# Altium footprint library FootPrintLib_11.PcbLib: 376 footprints (part 15 of 24)
Each footprint in its own frame and in the unit in brackets; x right, y up, seen from the top. Pads: shape width x height; smd on the part's side, far side on the other; paste and mask are expansions set on the pad; w line width, h text height; cw(c..) or ccw(c..) is an arc to the next point about the centre after c.
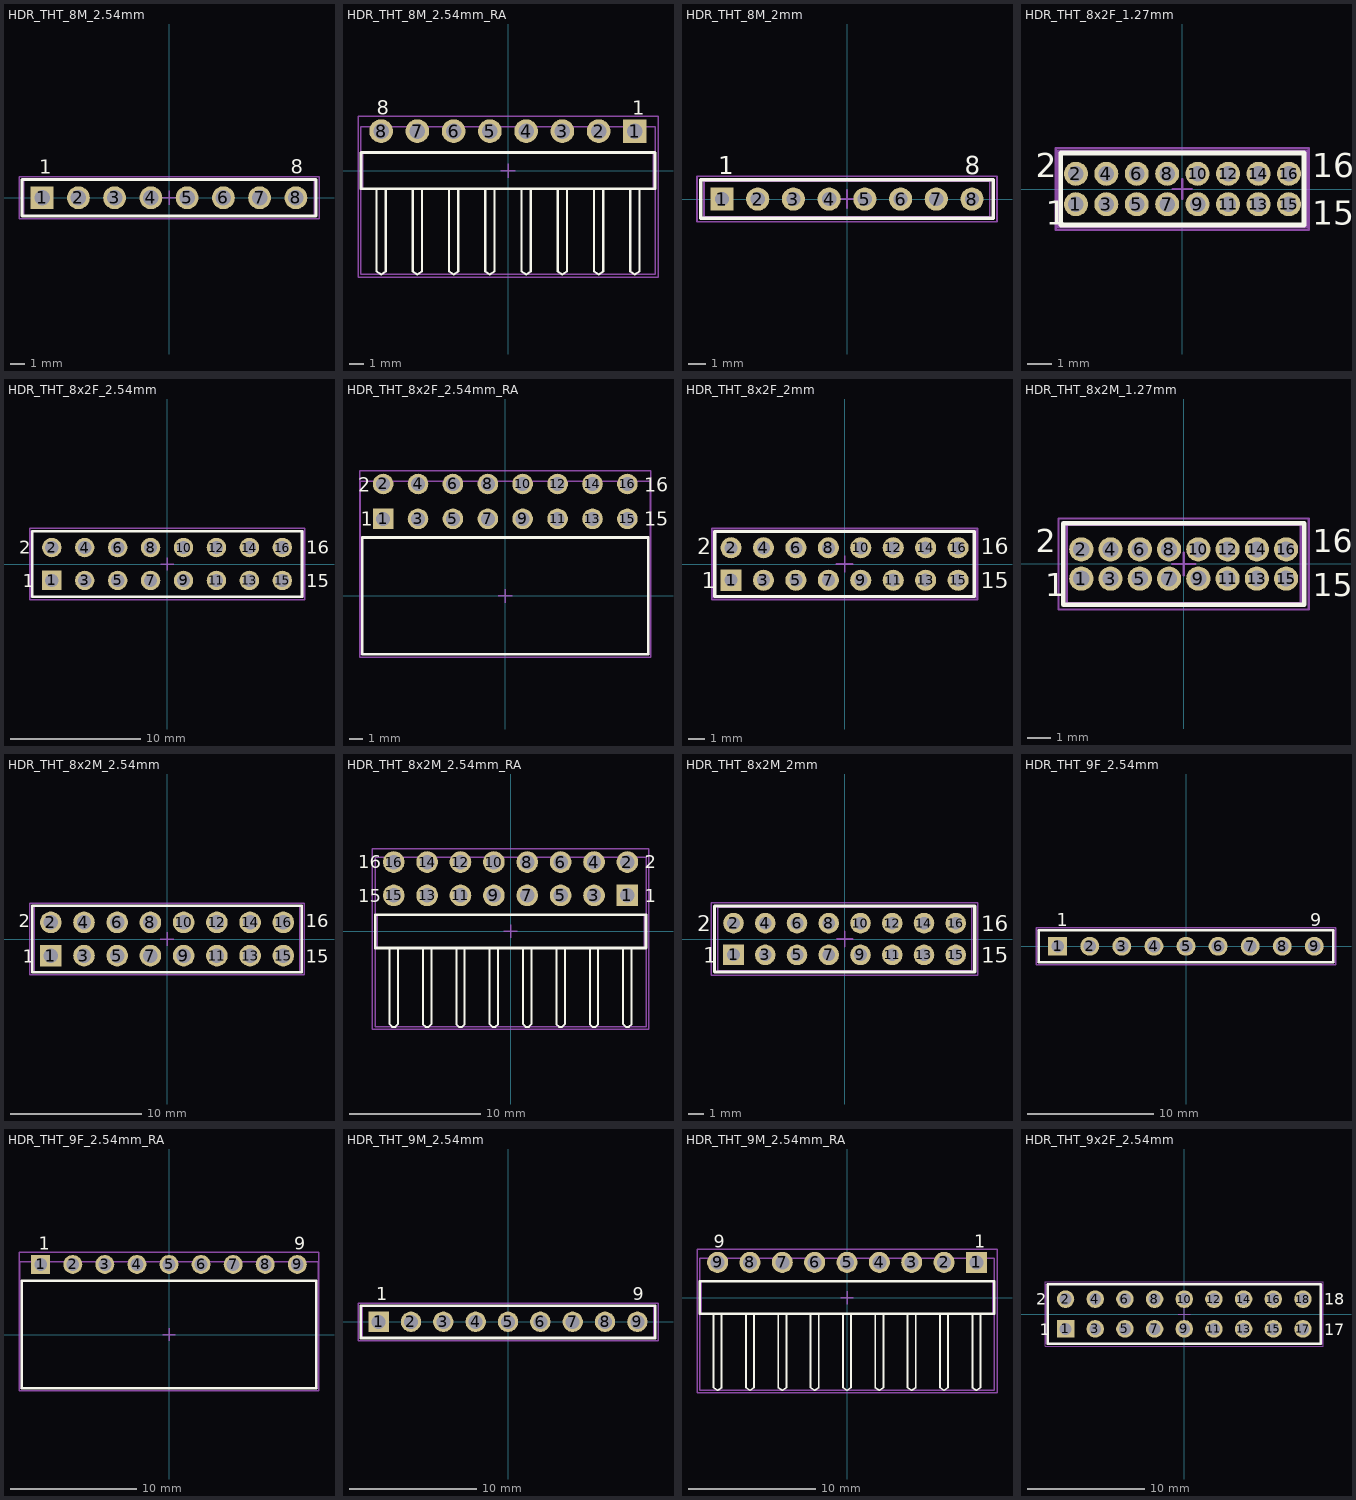
[diagram p14: the footprints below, top view; thin cyan lines are the x and y axes]

## HDR_THT_8M_2.54mm [mm] "Pin Header, pitch 2.54 mm, THT, Vertical, single row, 8p"
height 8.54
pads (8):
  rect 1.6x1.6 hole 1.1: 1(-8.89,0)
  round 1.6 hole 1.1: 2(-6.35,0) 3(-3.81,0) 4(-1.27,0) 5(1.27,0) 6(3.81,0) 7(6.35,0) 8(8.89,0)
Top Overlay:
  lines w0.2: -10.31,-1.27 10.31,-1.27 10.31,1.27 -10.31,1.27 -10.31,-1.27
  text "1" at -9.08,1.7 h1
  text "8" at 8.54,1.7 h1
Mechanical 11:
  lines w0.1: -10.16,-1.27 -10.16,1.27 10.16,1.27 10.16,-1.27 -10.16,-1.27
Mechanical 13:
  lines w0.1: -10.31,-1.27 10.31,-1.27 10.31,1.27 -10.31,1.27 -10.31,-1.27
Mechanical 15:
  lines w0.1: -0.5,0 0.5,0 ; 0,-0.5 0,0.5 ; -10.51,-1.47 10.51,-1.47 10.51,1.47 -10.51,1.47 -10.51,-1.47
3D body "61300811121.stp": height 8.57, standoff -2.97, extent -10.16,-1.27 10.16,1.27

## HDR_THT_8M_2.54mm_RA [mm] "Pin Header, pitch 2.54 mm, THT, Angled, single row, 8p"
height 2.54
pads (8):
  rect 1.65x1.65 hole 1.1: 1(8.89,2.77)
  round 1.65 hole 1.1: 2(6.35,2.77) 3(3.81,2.77) 4(1.27,2.77) 5(-1.27,2.77) 6(-3.81,2.77) 7(-6.35,2.77) 8(-8.89,2.77)
Top Overlay:
  lines w0.15: -9.21,-1.27 -9.21,-7.07 -8.89,-7.27 -8.57,-7.07 -8.57,-1.27 ; -6.67,-1.27 -6.67,-7.07 -6.35,-7.27 -6.03,-7.07 -6.03,-1.27 ; -4.13,-1.27 -4.13,-7.07 -3.81,-7.27 -3.49,-7.07 -3.49,-1.27 ; -1.59,-1.27 -1.59,-7.07 -1.27,-7.27 -0.95,-7.07 -0.95,-1.27 ; 0.95,-1.27 0.95,-7.07 1.27,-7.27 1.59,-7.07 1.59,-1.27 ; 3.49,-1.27 3.49,-7.07 3.81,-7.27 4.13,-7.07 4.13,-1.27 ; 6.03,-1.27 6.03,-7.07 6.35,-7.27 6.67,-7.07 6.67,-1.27 ; 8.57,-1.27 8.57,-7.07 8.89,-7.27 9.21,-7.07 9.21,-1.27
  lines w0.2: -10.31,-1.27 10.31,-1.27 10.31,1.27 -10.31,1.27 -10.31,-1.27
  text "1" at 8.72,3.9 h1
  text "8" at -9.21,3.9 h1
Mechanical 11:
  lines w0.1: -10.16,-1.27 10.16,-1.27 10.16,1.27 -10.16,1.27 -10.16,-1.27
Mechanical 13:
  lines w0.1: -10.31,-7.27 10.31,-7.27 10.31,3.09 -10.31,3.09 -10.31,-7.27
Mechanical 15:
  lines w0.1: -0.5,0 0.5,0 ; 0,-0.5 0,0.5 ; -10.51,-7.47 -10.51,3.795 10.51,3.795 10.51,-7.47 -10.51,-7.47
3D body "61300811021.stp": height 2.62, standoff -2.92, extent -10.16,-7.27 10.16,3.09

## HDR_THT_8M_2mm [mm] "Pin Header, pitch 2.00 mm, THT, Vertical, single row, 8p"
height 6.35
pads (8):
  rect 1.3x1.3 hole 0.8: 1(-7,0)
  round 1.3 hole 0.8: 2(-5,0) 3(-3,0) 4(-1,0) 5(1,0) 6(3,0) 7(5,0) 8(7,0)
Top Overlay:
  lines w0.2: -8.2,-1.075 -8.2,1.075 8.2,1.075 8.2,-1.075 -8.2,-1.075
  text "1" at -7.2,1.4 h1
  text "8" at 6.6,1.4 h1
Mechanical 11:
  lines w0.1: -8,-1 8,-1 8,1 -8,1 -8,-1
Mechanical 13:
  lines w0.1: -8.2,-1.075 -8.2,1.075 8.2,1.075 8.2,-1.075 -8.2,-1.075
Mechanical 15:
  lines w0.1: -0.5,0 0.5,0 ; 0,-0.5 0,0.5 ; -8.4,-1.275 -8.4,1.275 8.4,1.275 8.4,-1.275 -8.4,-1.275
3D body "62000811121.stp": height 6.05, standoff -2.65, extent -8,-1 8,1

## HDR_THT_8x2F_1.27mm [mm] "Socket Header, Pitch 1.27 mm, THT, Vertical, dual row, 16p"
height 4.65
pads (16):
  round 1 hole 0.65: 1(-4.445,-0.635) 2(-4.445,0.635) 3(-3.175,-0.635) 4(-3.175,0.635) 5(-1.905,-0.635) 6(-1.905,0.635) 7(-0.635,-0.635) 8(-0.635,0.635) 9(0.635,-0.635) 10(0.635,0.635) 11(1.905,-0.635) 12(1.905,0.635) 13(3.175,-0.635) 14(3.175,0.635) 15(4.445,-0.635) 16(4.445,0.635)
Top Overlay:
  lines w0.2: -5.08,-1.5 5.08,-1.5 5.08,1.5 -5.08,1.5 -5.08,-1.5
  text "16" at 5.41,0.5 h1
  text "15" at 5.41,-1.5 h1
  text "2" at -6.11,0.5 h1
  text "1" at -5.71,-1.5 h1
Mechanical 11:
  lines w0.1: -5.08,-1.5 5.08,-1.5 5.08,1.5 -5.08,1.5 -5.08,-1.5
Mechanical 13:
  lines w0.1: -5.205,-1.575 -5.205,1.575 5.205,1.575 5.205,-1.575 -5.205,-1.575
Mechanical 15:
  lines w0.1: -0.4,0 0.4,0 ; 0,-0.4 0,0.4 ; -5.28,-1.7 5.28,-1.7 5.28,1.7 -5.28,1.7 -5.28,-1.7
3D body "62201621821.stp": height 4.55, standoff -2.15, extent -5.28,-1.5 5.28,1.5

## HDR_THT_8x2F_2.54mm [mm] "Socket Header, Pitch 2.54 mm, THT, Vertical, dual row, 16p"
height 8.4
pads (16):
  rect 1.5x1.5 hole 1.02: 1(-8.89,-1.27)
  round 1.5 hole 1.02: 2(-8.89,1.27) 3(-6.35,-1.27) 4(-6.35,1.27) 5(-3.81,-1.27) 6(-3.81,1.27) 7(-1.27,-1.27) 8(-1.27,1.27) 9(1.27,-1.27) 10(1.27,1.27) 11(3.81,-1.27) 12(3.81,1.27) 13(6.35,-1.27) 14(6.35,1.27) 15(8.89,-1.27) 16(8.89,1.27)
Top Overlay:
  lines w0.2: -10.41,-2.54 -10.41,2.54 10.41,2.54 10.41,-2.54 -10.41,-2.54
  text "2" at -11.42,0.8 h1
  text "1" at -11.12,-1.8 h1
  text "15" at 10.72,-1.8 h1
  text "16" at 10.72,0.8 h1
Mechanical 11:
  lines w0.1: -10.41,-2.54 10.41,-2.54 10.41,2.54 -10.41,2.54 -10.41,-2.54
Mechanical 13:
  lines w0.1: -10.535,-2.54 -10.535,2.54 10.535,2.54 10.535,-2.54 -10.535,-2.54
Mechanical 15:
  lines w0.1: -0.5,0 0.5,0 ; 0,-0.5 0,0.5 ; -10.61,-2.74 -10.61,2.74 10.61,2.74 10.61,-2.74 -10.61,-2.74
3D body "61301621821.stp": height 8.45, standoff -3.05, extent -10.41,-2.54 10.41,2.54

## HDR_THT_8x2F_2.54mm_RA [mm] "Socket Header, Pitch 2.54 mm, THT, Angled, dual row, 16p"
height 5.08
pads (16):
  rect 1.5x1.5 hole 1.02: 1(-8.89,5.61)
  round 1.5 hole 1.02: 2(-8.89,8.15) 3(-6.35,5.61) 4(-6.35,8.15) 5(-3.81,5.61) 6(-3.81,8.15) 7(-1.27,5.61) 8(-1.27,8.15) 9(1.27,5.61) 10(1.27,8.15) 11(3.81,5.61) 12(3.81,8.15) 13(6.35,5.61) 14(6.35,8.15) 15(8.89,5.61) 16(8.89,8.15)
Top Overlay:
  lines w0.2: -10.41,-4.25 -10.41,4.25 10.41,4.25 10.41,-4.25 -10.41,-4.25
  text "2" at -10.72,7.6 h1
  text "1" at -10.52,5.1 h1
  text "15" at 10.12,5.1 h1
  text "16" at 10.12,7.6 h1
Mechanical 11:
  lines w0.1: -10.41,-4.25 10.41,-4.25 10.41,4.25 -10.41,4.25 -10.41,-4.25
Mechanical 13:
  lines w0.1: -10.56,-4.25 10.56,-4.25 10.56,8.35 -10.56,8.35 -10.56,-4.25
Mechanical 15:
  lines w0.1: -0.5,0 0.5,0 ; 0,-0.5 0,0.5 ; -10.61,-4.45 10.61,-4.45 10.61,9.1 -10.61,9.1 -10.61,-4.45
3D body "613016243121.stp": height 5.05, standoff -3.25, extent -10.41,-4.25 10.41,8.35

## HDR_THT_8x2F_2mm [mm] "Socket Header, Pitch 2.00 mm, THT, Vertical, dual row, 16p"
height 4.45
pads (16):
  rect 1.3x1.3 hole 0.8: 1(-7,-1)
  round 1.3 hole 0.8: 2(-7,1) 3(-5,-1) 4(-5,1) 5(-3,-1) 6(-3,1) 7(-1,-1) 8(-1,1) 9(1,-1) 10(1,1) 11(3,-1) 12(3,1) 13(5,-1) 14(5,1) 15(7,-1) 16(7,1)
Top Overlay:
  lines w0.2: -8,-2 8,-2 8,2 -8,2 -8,-2
  text "15" at 8.4,-1.5 h1
  text "16" at 8.4,0.6 h1
  text "2" at -9.1,0.6 h1
  text "1" at -8.8,-1.5 h1
Mechanical 11:
  lines w0.1: -8,-2 8,-2 8,2 -8,2 -8,-2
Mechanical 13:
  lines w0.1: -8.15,-2.075 8.15,-2.075 8.15,2.075 -8.15,2.075 -8.15,-2.075
Mechanical 15:
  lines w0.1: -0.5,0 0.5,0 ; 0,-0.5 0,0.5 ; -8.2,-2.2 8.2,-2.2 8.2,2.2 -8.2,2.2 -8.2,-2.2
3D body "62001621821.stp": height 4.35, standoff -2.35, extent -8.25,-2 8.25,2

## HDR_THT_8x2M_1.27mm [mm] "Pin Header, pitch 1.27 mm, THT, Vertical, dual row, 16p"
height 5.65
pads (16):
  round 1.05 hole 0.7: 1(-4.445,-0.635) 2(-4.445,0.635) 3(-3.175,-0.635) 4(-3.175,0.635) 5(-1.905,-0.635) 6(-1.905,0.635) 7(-0.635,-0.635) 8(-0.635,0.635) 9(0.635,-0.635) 10(0.635,0.635) 11(1.905,-0.635) 12(1.905,0.635) 13(3.175,-0.635) 14(3.175,0.635) 15(4.445,-0.635) 16(4.445,0.635)
Top Overlay:
  lines w0.2: -5.23,-1.775 -5.23,1.775 5.23,1.775 5.23,-1.775 -5.23,-1.775
  text "16" at 5.61,0.5 h1
  text "15" at 5.61,-1.4 h1
  text "1" at -6.01,-1.4 h1
  text "2" at -6.41,0.5 h1
Mechanical 11:
  lines w0.1: -5.08,-1.7 -5.08,1.7 5.08,1.7 5.08,-1.7 -5.08,-1.7
Mechanical 13:
  lines w0.1: -5.23,-1.775 -5.23,1.775 5.23,1.775 5.23,-1.775 -5.23,-1.775
Mechanical 15:
  lines w0.1: -0.5,0 0.5,0 ; 0,-0.5 0,0.5 ; -5.43,-1.975 5.43,-1.975 5.43,1.975 -5.43,1.975 -5.43,-1.975
3D body "62201621121.stp": height 5.33, standoff -2.27, extent -5.08,-1.7 5.08,1.7

## HDR_THT_8x2M_2.54mm [mm] "Pin Header, pitch 2.54 mm, THT, Vertical, dual row, 16p"
height 8.54
pads (16):
  rect 1.65x1.65 hole 1.1: 1(-8.89,-1.27)
  round 1.65 hole 1.1: 2(-8.89,1.27) 3(-6.35,-1.27) 4(-6.35,1.27) 5(-3.81,-1.27) 6(-3.81,1.27) 7(-1.27,-1.27) 8(-1.27,1.27) 9(1.27,-1.27) 10(1.27,1.27) 11(3.81,-1.27) 12(3.81,1.27) 13(6.35,-1.27) 14(6.35,1.27) 15(8.89,-1.27) 16(8.89,1.27)
Top Overlay:
  lines w0.2: -10.31,-2.54 -10.31,2.54 10.31,2.54 10.31,-2.54 -10.31,-2.54
  text "16" at 10.62,0.9 h1
  text "15" at 10.62,-1.8 h1
  text "2" at -11.32,0.9 h1
  text "1" at -11.02,-1.8 h1
Mechanical 11:
  lines w0.1: -10.16,-2.54 -10.16,2.54 10.16,2.54 10.16,-2.54 -10.16,-2.54
Mechanical 13:
  lines w0.1: -10.31,-2.54 -10.31,2.54 10.31,2.54 10.31,-2.54 -10.31,-2.54
Mechanical 15:
  lines w0.1: -0.5,0 0.5,0 ; 0,-0.5 0,0.5 ; -10.51,-2.74 -10.51,2.74 10.51,2.74 10.51,-2.74 -10.51,-2.74
3D body "61301621121.stp": height 8.59, standoff -2.95, extent -10.16,-2.54 10.16,2.54

## HDR_THT_8x2M_2.54mm_RA [mm] "Pin Header, pitch 2.54 mm, THT, Angled, dual row, 16p"
height 5.08
pads (16):
  rect 1.65x1.65 hole 1.1: 1(8.89,2.73)
  round 1.65 hole 1.1: 2(8.89,5.27) 3(6.35,2.73) 4(6.35,5.27) 5(3.81,2.73) 6(3.81,5.27) 7(1.27,2.73) 8(1.27,5.27) 9(-1.27,2.73) 10(-1.27,5.27) 11(-3.81,2.73) 12(-3.81,5.27) 13(-6.35,2.73) 14(-6.35,5.27) 15(-8.89,2.73) 16(-8.89,5.27)
Top Overlay:
  lines w0.15: -9.21,-1.335 -9.21,-7.07 -9.01,-7.27 -8.77,-7.27 -8.57,-7.07 -8.57,-1.31 ; -6.67,-1.335 -6.67,-7.07 -6.47,-7.27 -6.23,-7.27 -6.03,-7.07 -6.03,-1.31 ; -4.13,-1.335 -4.13,-7.07 -3.93,-7.27 -3.69,-7.27 -3.49,-7.07 -3.49,-1.31 ; -1.59,-1.335 -1.59,-7.07 -1.39,-7.27 -1.15,-7.27 -0.95,-7.07 -0.95,-1.31 ; 0.95,-1.335 0.95,-7.07 1.15,-7.27 1.39,-7.27 1.59,-7.07 1.59,-1.31 ; 3.49,-1.335 3.49,-7.07 3.69,-7.27 3.93,-7.27 4.13,-7.07 4.13,-1.31 ; 6.03,-1.335 6.03,-7.07 6.23,-7.27 6.47,-7.27 6.67,-7.07 6.67,-1.31 ; 8.57,-1.335 8.57,-7.07 8.77,-7.27 9.01,-7.27 9.21,-7.07 9.21,-1.31
  lines w0.2: -10.31,-1.27 -10.31,1.27 10.31,1.27 10.31,-1.27 -10.31,-1.27
  text "15" at -11.61,2.2 h1
  text "16" at -11.61,4.8 h1
  text "1" at 10.22,2.2 h1
  text "2" at 10.22,4.8 h1
Mechanical 11:
  lines w0.1: -10.16,-1.27 -10.16,1.27 10.16,1.27 10.16,-1.27 -10.16,-1.27
Mechanical 13:
  lines w0.1: -10.31,-7.27 10.31,-7.27 10.31,5.63 -10.31,5.63 -10.31,-7.27
Mechanical 15:
  lines w0.1: -0.5,0 0.5,0 ; 0,-0.5 0,0.5 ; -10.51,-7.47 10.51,-7.47 10.51,6.295 -10.51,6.295 -10.51,-7.47
3D body "61301621021.stp": height 5.14, standoff -2.94, extent -10.16,-7.27 10.16,5.63

## HDR_THT_8x2M_2mm [mm] "2.00 mm THT Dual Pin Header, 16p"
height 6
pads (16):
  rect 1.3x1.3 hole 0.8: 1(-7,-1)
  round 1.3 hole 0.8: 2(-7,1) 3(-5,-1) 4(-5,1) 5(-3,-1) 6(-3,1) 7(-1,-1) 8(-1,1) 9(1,-1) 10(1,1) 11(3,-1) 12(3,1) 13(5,-1) 14(5,1) 15(7,-1) 16(7,1)
Top Overlay:
  lines w0.2: -8.2,-2.075 8.2,-2.075 8.2,2.075 -8.2,2.075 -8.2,-2.075
  text "16" at 8.6,0.5 h1
  text "15" at 8.6,-1.5 h1
  text "2" at -9.3,0.5 h1
  text "1" at -8.9,-1.5 h1
Mechanical 11:
  lines w0.1: -8,-2 8,-2 8,2 -8,2 -8,-2
Mechanical 13:
  lines w0.1: -8.2,-2.075 8.2,-2.075 8.2,2.075 -8.2,2.075 -8.2,-2.075
Mechanical 15:
  lines w0.1: -0.5,0 0.5,0 ; 0,-0.5 0,0.5 ; -8.4,-2.275 8.4,-2.275 8.4,2.275 -8.4,2.275 -8.4,-2.275
3D body "62001621121.stp": height 6.05, standoff -2.65, extent -8,-2 8,2

## HDR_THT_9F_2.54mm [mm] "Socket Header, Pitch 2.54 mm, THT, Vertical, single row, 9p"
height 8.5
pads (9):
  rect 1.5x1.5 hole 1.02: 1(-10.16,0)
  round 1.5 hole 1.02: 2(-7.62,0) 3(-5.08,0) 4(-2.54,0) 5(0,0) 6(2.54,0) 7(5.08,0) 8(7.62,0) 9(10.16,0)
Top Overlay:
  lines w0.2: -11.68,-1.25 11.68,-1.25 11.68,1.25 -11.68,1.25 -11.68,-1.25
  text "9" at 9.85,1.6 h1
  text "1" at -10.25,1.6 h1
Mechanical 11:
  lines w0.1: -11.68,-1.25 11.68,-1.25 11.68,1.25 -11.68,1.25 -11.68,-1.25
Mechanical 13:
  lines w0.1: -11.805,-1.25 -11.805,1.25 11.805,1.25 11.805,-1.25 -11.805,-1.25
Mechanical 15:
  lines w0.1: -0.5,0 0.5,0 ; 0,-0.5 0,0.5 ; -11.88,-1.45 -11.88,1.45 11.88,1.45 11.88,-1.45 -11.88,-1.45
3D body "61300911821.stp": height 8.55, standoff -3.06, extent -11.68,-1.25 11.68,1.25

## HDR_THT_9F_2.54mm_RA [mm] "Socket Header, Pitch 2.54 mm, THT, Angled, single row, 19p"
height 2.5
pads (9):
  rect 1.5x1.5 hole 1.02: 1(-10.16,5.55)
  round 1.5 hole 1.02: 2(-7.62,5.55) 3(-5.08,5.55) 4(-2.54,5.55) 5(0,5.55) 6(2.54,5.55) 7(5.08,5.55) 8(7.62,5.55) 9(10.16,5.55)
Top Overlay:
  lines w0.2: -11.68,-4.25 -11.68,4.25 11.68,4.25 11.68,-4.25 -11.68,-4.25
  text "9" at 9.9,6.7 h1
  text "1" at -10.32,6.7 h1
Mechanical 11:
  lines w0.1: -11.68,-4.25 11.68,-4.25 11.68,4.25 -11.68,4.25 -11.68,-4.25
Mechanical 13:
  lines w0.1: -11.805,-4.25 -11.805,5.75 11.805,5.75 11.805,-4.25 -11.805,-4.25
Mechanical 15:
  lines w0.1: -0.5,0 0.5,0 ; 0,-0.5 0,0.5 ; -11.88,-4.45 -11.88,6.5 11.88,6.5 11.88,-4.45 -11.88,-4.45
3D body "613009143121.stp": height 2.55, standoff -3.04, extent -11.68,-4.25 11.68,5.75

## HDR_THT_9M_2.54mm [mm] "Pin Header, pitch 2.54 mm, THT, Vertical, single row, 9p"
height 8.54
pads (9):
  rect 1.6x1.6 hole 1.1: 1(-10.16,0)
  round 1.6 hole 1.1: 2(-7.62,0) 3(-5.08,0) 4(-2.54,0) 5(0,0) 6(2.54,0) 7(5.08,0) 8(7.62,0) 9(10.16,0)
Top Overlay:
  lines w0.2: -11.58,-1.27 -11.58,1.27 11.58,1.27 11.58,-1.27 -11.58,-1.27
  text "9" at 9.81,1.7 h1
  text "1" at -10.35,1.7 h1
Mechanical 11:
  lines w0.1: -11.43,-1.27 11.43,-1.27 11.43,1.27 -11.43,1.27 -11.43,-1.27
Mechanical 13:
  lines w0.1: -11.58,-1.27 -11.58,1.27 11.58,1.27 11.58,-1.27 -11.58,-1.27
Mechanical 15:
  lines w0.1: -0.5,0 0.5,0 ; 0,-0.5 0,0.5 ; -11.78,-1.47 -11.78,1.47 11.78,1.47 11.78,-1.47 -11.78,-1.47
3D body "61300911121.stp": height 8.57, standoff -2.97, extent -11.43,-1.27 11.43,1.27

## HDR_THT_9M_2.54mm_RA [mm] "Pin Header, pitch 2.54 mm, THT, Angled, single row, 9p"
height 2.54
pads (9):
  rect 1.65x1.65 hole 1.1: 1(10.16,2.77)
  round 1.65 hole 1.1: 2(7.62,2.77) 3(5.08,2.77) 4(2.54,2.77) 5(0,2.77) 6(-2.54,2.77) 7(-5.08,2.77) 8(-7.62,2.77) 9(-10.16,2.77)
Top Overlay:
  lines w0.15: -10.48,-1.27 -10.48,-7.07 -10.16,-7.27 -9.84,-7.07 -9.84,-1.27 ; -7.94,-1.27 -7.94,-7.07 -7.62,-7.27 -7.3,-7.07 -7.3,-1.27 ; -5.4,-1.27 -5.4,-7.07 -5.08,-7.27 -4.76,-7.07 -4.76,-1.27 ; -2.86,-1.27 -2.86,-7.07 -2.54,-7.27 -2.22,-7.07 -2.22,-1.27 ; -0.32,-1.27 -0.32,-7.07 0,-7.27 0.32,-7.07 0.32,-1.27 ; 2.22,-1.27 2.22,-7.07 2.54,-7.27 2.86,-7.07 2.86,-1.27 ; 4.76,-1.27 4.76,-7.07 5.08,-7.27 5.4,-7.07 5.4,-1.27 ; 7.3,-1.27 7.3,-7.07 7.62,-7.27 7.94,-7.07 7.94,-1.27 ; 9.84,-1.27 9.84,-7.07 10.16,-7.27 10.48,-7.07 10.48,-1.27
  lines w0.2: -11.58,-1.27 11.58,-1.27 11.58,1.27 -11.58,1.27 -11.58,-1.27
  text "1" at 9.99,3.9 h1
  text "9" at -10.48,3.9 h1
Mechanical 11:
  lines w0.1: -11.43,-1.27 11.43,-1.27 11.43,1.27 -11.43,1.27 -11.43,-1.27
Mechanical 13:
  lines w0.1: -11.58,-7.27 11.58,-7.27 11.58,3.09 -11.58,3.09 -11.58,-7.27
Mechanical 15:
  lines w0.1: -0.5,0 0.5,0 ; 0,-0.5 0,0.5 ; -11.78,-7.47 -11.78,3.795 11.78,3.795 11.78,-7.47 -11.78,-7.47
3D body "61300911021.stp": height 2.62, standoff -2.92, extent -11.43,-7.27 11.43,3.09

## HDR_THT_9x2F_2.54mm [mm] "Socket Header, Pitch 2.54 mm, THT, Vertical, dual row, 18p"
height 8.4
pads (18):
  rect 1.5x1.5 hole 1.02: 1(-10.16,-1.27)
  round 1.5 hole 1.02: 2(-10.16,1.27) 3(-7.62,-1.27) 4(-7.62,1.27) 5(-5.08,-1.27) 6(-5.08,1.27) 7(-2.54,-1.27) 8(-2.54,1.27) 9(0,-1.27) 10(0,1.27) 11(2.54,-1.27) 12(2.54,1.27) 13(5.08,-1.27) 14(5.08,1.27) 15(7.62,-1.27) 16(7.62,1.27) 17(10.16,-1.27) 18(10.16,1.27)
Top Overlay:
  lines w0.2: -11.68,-2.54 -11.68,2.54 11.68,2.54 11.68,-2.54 -11.68,-2.54
  text "2" at -12.69,0.8 h1
  text "1" at -12.39,-1.8 h1
  text "17" at 11.99,-1.8 h1
  text "18" at 11.99,0.8 h1
Mechanical 11:
  lines w0.1: -11.68,-2.54 11.68,-2.54 11.68,2.54 -11.68,2.54 -11.68,-2.54
Mechanical 13:
  lines w0.1: -11.805,-2.54 -11.805,2.54 11.805,2.54 11.805,-2.54 -11.805,-2.54
Mechanical 15:
  lines w0.1: -0.5,0 0.5,0 ; 0,-0.5 0,0.5 ; -11.88,-2.74 -11.88,2.74 11.88,2.74 11.88,-2.74 -11.88,-2.74
3D body "61301821821.stp": height 8.45, standoff -3.05, extent -11.68,-2.54 11.68,2.54